# Altium footprint library connectors.PcbLib: 2 footprints
Each footprint in its own frame and in the unit in brackets; x right, y up, seen from the top. Pads: shape width x height; smd on the part's side, far side on the other; paste and mask are expansions set on the pad; w line width, h text height; cw(c..) or ccw(c..) is an arc to the next point about the centre after c.
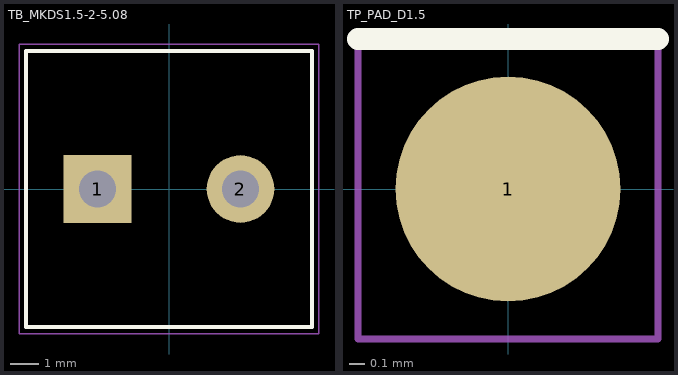
[diagram p0: the footprints below, top view; thin cyan lines are the x and y axes]

## TB_MKDS1.5-2-5.08 [mm] "Phoenix MKDS 1,5/2-5,08 (1715721): pitch 5.08, hole 1.3, pin 0.9x0.9"
height 13.8
pads (2):
  rect 2.4x2.4 hole 1.3: 1(-2.54,0)
  round 2.4 hole 1.3: 2(2.54,0)
Top Overlay:
  lines w0.15: -5.08,-4.9 5.08,-4.9 5.08,4.9 -5.08,4.9 -5.08,-4.9
  text ".Designator" at 0,1.8 h1
Top Courtyard:
  lines w0.05: -5.33,-5.15 5.33,-5.15 5.33,5.15 -5.33,5.15 -5.33,-5.15
3D body: height 13.8, standoff 0, extent -5.08,-4.9 5.08,4.9

## TP_PAD_D1.5 [mm] "SMD test pad 1.5 mm, no paste, no component body"
pads (1):
  round 1.5 smd paste-0.75: 1(0,0)
Top Overlay:
  lines w0.15: -1,1 1,1
  text ".Designator" at 0,1.35 h1
Top Courtyard:
  lines w0.05: -1,-1 -1,1 1,1 1,-1 -1,-1